# Altium footprint library CHIP-Library.PcbLib: 345 footprints (part 19 of 22)
Each footprint in its own frame and in the unit in brackets; x right, y up, seen from the top. Pads: shape width x height; smd on the part's side, far side on the other; paste and mask are expansions set on the pad; w line width, h text height; cw(c..) or ccw(c..) is an arc to the next point about the centre after c.
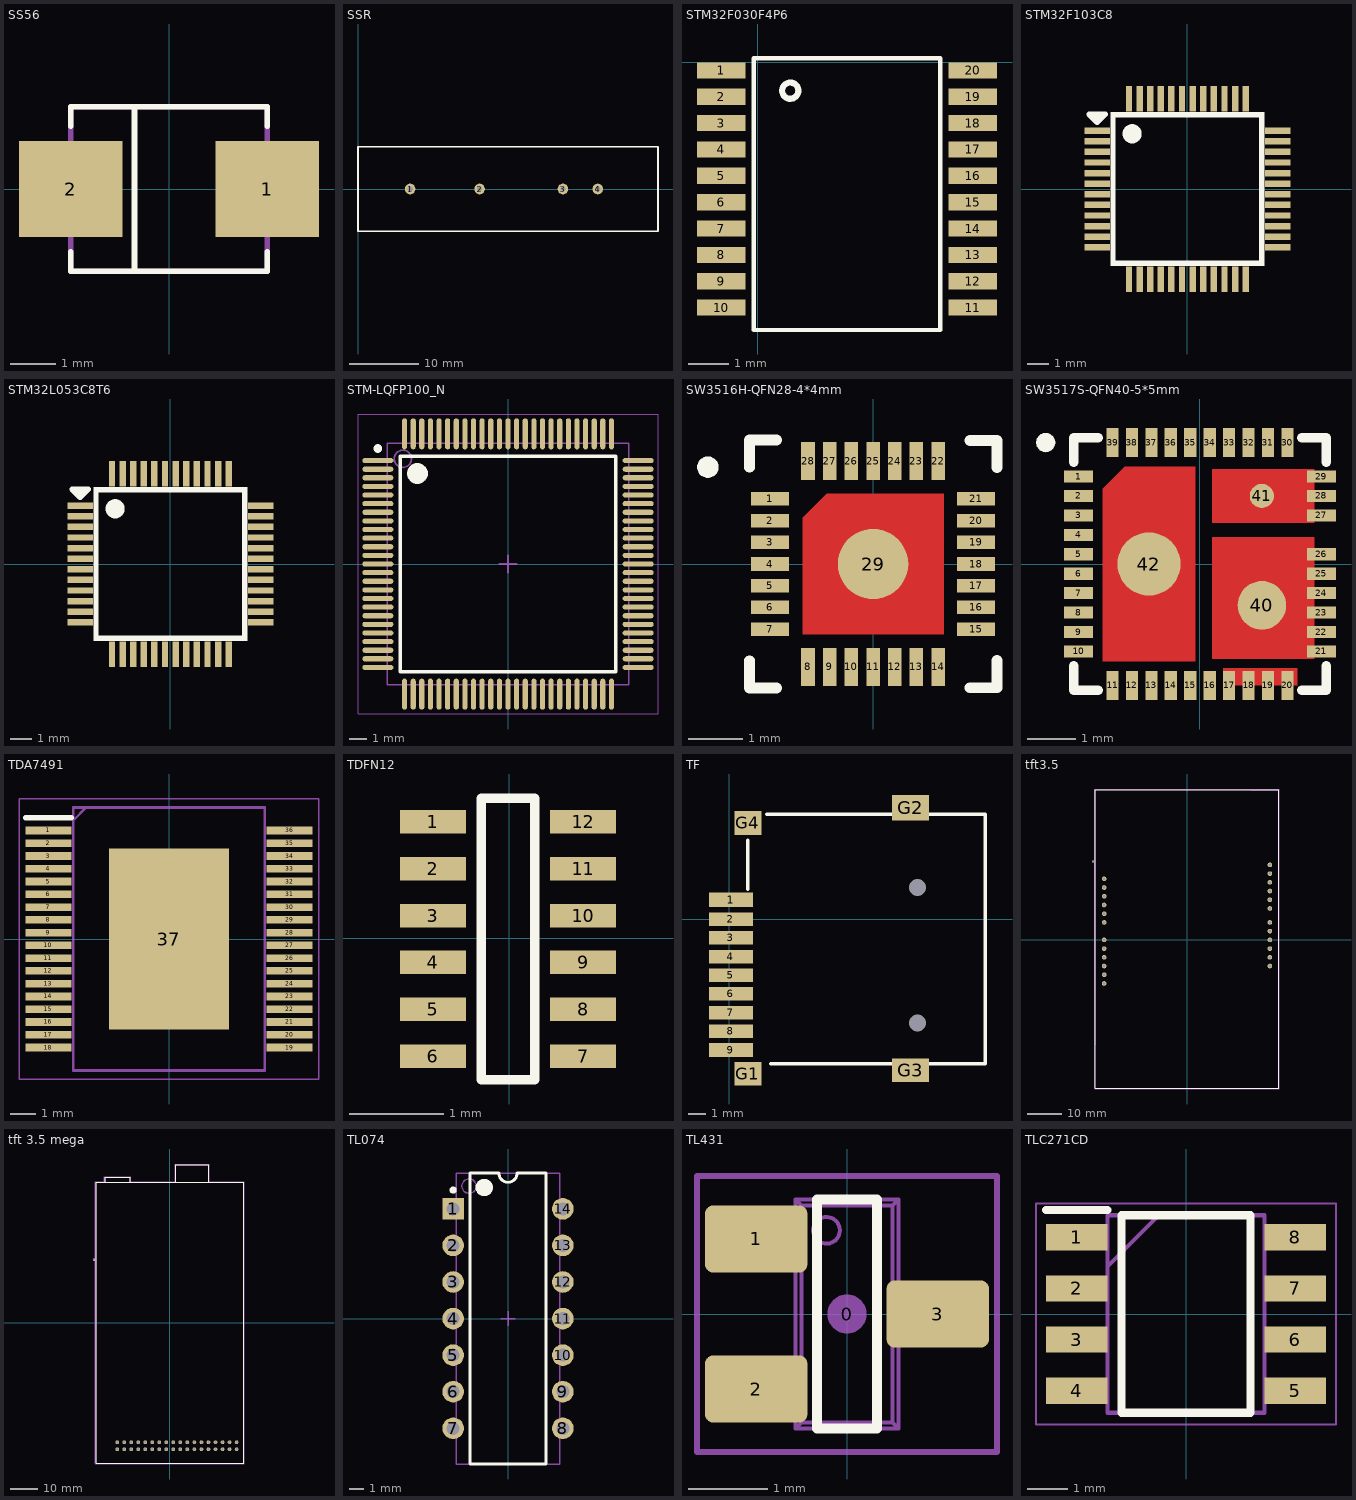
[diagram p18: the footprints below, top view; thin cyan lines are the x and y axes]

## SS56 [mm] "SMB"
height 2.65
pads (2):
  rect 2.28x2.12 smd: 1(2.165,0) 2(-2.165,0)
Top Overlay:
  lines w0.127: -2.163,-1.38 -2.163,-1.813 2.163,-1.813 2.163,-1.38 ; -2.163,1.38 -2.163,1.813 2.163,1.813 2.163,1.38 ; -0.762,-1.813 -0.762,1.813
Mechanical 13:
  lines w0.127: -2.163,-1.813 2.163,-1.813 2.163,1.813 -2.163,1.813 -2.163,-1.813
3D body "step_temp.STEP": height 2.65, standoff 0, extent -2.67,-1.813 2.67,1.813

## SSR [mil] "HHG1D-1"
pads (4):
  round 60 hole 30: 1(295.28,0) 2(688.98,0) 3(1161.42,0) 4(1358.27,0)
Top Overlay:
  lines w10: 0,-240 1700,-240 1700,240 0,240 0,0 0,-240

## STM32F030F4P6 [mm]
pads (20):
  rect 1.2x0.4 smd: 1(-0.9,-0.2) 2(-0.9,-0.85) 3(-0.9,-1.5) 4(-0.9,-2.15) 5(-0.9,-2.8) 6(-0.9,-3.45) 7(-0.9,-4.1) 8(-0.9,-4.75) 9(-0.9,-5.4) 10(-0.9,-6.05) 11(5.3,-6.05) 12(5.3,-5.4) 13(5.3,-4.75) 14(5.3,-4.1) 15(5.3,-3.45) 16(5.3,-2.8) 17(5.3,-2.15) 18(5.3,-1.5) 19(5.3,-0.85) 20(5.3,-0.2)
Top Overlay:
  circle w0.15: c0.8,-0.7 r0.2
  lines w0.1: -0.1,-6.6 -0.1,0.1 4.5,0.1 4.5,-6.6 -0.1,-6.6
3D body "STM32F030F4P6.STEP": height 1.1, standoff -0.09, extent -0.94,-6.5 5.34,0

## STM32F103C8 [mm]
height 5.33
pads (48):
  rect 1.2x0.3 smd mask+0.051: 1(-4.25,2.75) 2(-4.25,2.25) 3(-4.25,1.75) 4(-4.25,1.25) 5(-4.25,0.75) 6(-4.25,0.25) 7(-4.25,-0.25) 8(-4.25,-0.75) 9(-4.25,-1.25) 10(-4.25,-1.75) 11(-4.25,-2.25) 12(-4.25,-2.75) 25(4.25,-2.75) 26(4.25,-2.25) 27(4.25,-1.75) 28(4.25,-1.25) 29(4.25,-0.75) 30(4.25,-0.25) 31(4.25,0.25) 32(4.25,0.75) 33(4.25,1.25) 34(4.25,1.75) 35(4.25,2.25) 36(4.25,2.75)
  rect 0.3x1.2 smd mask+0.051: 13(-2.75,-4.25) 14(-2.25,-4.25) 15(-1.75,-4.25) 16(-1.25,-4.25) 17(-0.75,-4.25) 18(-0.25,-4.25) 19(0.25,-4.25) 20(0.75,-4.25) 21(1.25,-4.25) 22(1.75,-4.25) 23(2.25,-4.25) 24(2.75,-4.25) 37(2.75,4.25) 38(2.25,4.25) 39(1.75,4.25) 40(1.25,4.25) 41(0.75,4.25) 42(0.25,4.25) 43(-0.25,4.25) 44(-0.75,4.25) 45(-1.25,4.25) 46(-1.75,4.25) 47(-2.25,4.25) 48(-2.75,4.25)
Top Overlay:
  circle w0.6: c-2.6,2.6 r0.15
  rectangle: -3.373,-3.627 3.627,-3.373
  region: 3.373,3.373 3.373,-3.627 3.627,-3.627 3.627,3.373
  region: -2.992,-3.373 -3.627,-3.373 -3.627,-3.627 -2.992,-3.627
  region: -3.627,-2.992 -3.627,-3.627 -3.373,-3.627 -3.373,-2.992
  region: -2.992,3.627 -3.627,3.627 -3.627,3.373 -2.992,3.373
  region: -3.373,-3.627 -3.373,3.627 -3.627,3.627 -3.627,-3.627
  region: 3.627,2.992 3.627,3.627 3.373,3.627 3.373,2.992
  rectangle: -3.175,3.373 3.627,3.627
  region: -4.25,3.131 -3.869,3.512 -4.631,3.512
  lines w0.254: -3.5,-3.119 -3.5,-3.5 -3.119,-3.5 ; -3.5,3.119 -3.5,3.5 -3.119,3.5 ; 3.119,-3.5 3.5,-3.5 3.5,-3.119 ; 3.119,3.5 3.5,3.5 3.5,3.119 ; -4.631,3.512 -4.25,3.131 -3.869,3.512 -4.25,3.512 -4.631,3.512
3D body "LQFP48.STEP": height 1.5, standoff 0, extent -4.5,-4.5 4.5,4.5

## STM32L053C8T6 [mm]
height 5.33
pads (48):
  rect 1.2x0.3 smd mask+0.051: 1(-4.25,2.75) 2(-4.25,2.25) 3(-4.25,1.75) 4(-4.25,1.25) 5(-4.25,0.75) 6(-4.25,0.25) 7(-4.25,-0.25) 8(-4.25,-0.75) 9(-4.25,-1.25) 10(-4.25,-1.75) 11(-4.25,-2.25) 12(-4.25,-2.75) 25(4.25,-2.75) 26(4.25,-2.25) 27(4.25,-1.75) 28(4.25,-1.25) 29(4.25,-0.75) 30(4.25,-0.25) 31(4.25,0.25) 32(4.25,0.75) 33(4.25,1.25) 34(4.25,1.75) 35(4.25,2.25) 36(4.25,2.75)
  rect 0.3x1.2 smd mask+0.051: 13(-2.75,-4.25) 14(-2.25,-4.25) 15(-1.75,-4.25) 16(-1.25,-4.25) 17(-0.75,-4.25) 18(-0.25,-4.25) 19(0.25,-4.25) 20(0.75,-4.25) 21(1.25,-4.25) 22(1.75,-4.25) 23(2.25,-4.25) 24(2.75,-4.25) 37(2.75,4.25) 38(2.25,4.25) 39(1.75,4.25) 40(1.25,4.25) 41(0.75,4.25) 42(0.25,4.25) 43(-0.25,4.25) 44(-0.75,4.25) 45(-1.25,4.25) 46(-1.75,4.25) 47(-2.25,4.25) 48(-2.75,4.25)
Top Overlay:
  circle w0.6: c-2.6,2.6 r0.15
  rectangle: -3.175,3.373 3.627,3.627
  region: 3.627,2.992 3.627,3.627 3.373,3.627 3.373,2.992
  region: -3.373,-3.627 -3.373,3.627 -3.627,3.627 -3.627,-3.627
  region: -2.992,3.627 -3.627,3.627 -3.627,3.373 -2.992,3.373
  region: -3.627,-2.992 -3.627,-3.627 -3.373,-3.627 -3.373,-2.992
  region: -2.992,-3.373 -3.627,-3.373 -3.627,-3.627 -2.992,-3.627
  region: 3.373,3.373 3.373,-3.627 3.627,-3.627 3.627,3.373
  rectangle: -3.373,-3.627 3.627,-3.373
  region: -4.25,3.131 -3.869,3.512 -4.631,3.512
  lines w0.254: -3.5,-3.119 -3.5,-3.5 -3.119,-3.5 ; -3.5,3.119 -3.5,3.5 -3.119,3.5 ; 3.119,-3.5 3.5,-3.5 3.5,-3.119 ; 3.119,3.5 3.5,3.5 3.5,3.119 ; -4.631,3.512 -4.25,3.512 -3.869,3.512 -4.25,3.131 -4.631,3.512
3D body "LQFP48.STEP": height 1.5, standoff 0, extent -4.5,-4.5 4.5,4.5

## STM-LQFP100_N [mm] "Thin QFP, 100-Leads, Body 14x14mm, Pitch 0.5mm, IPC Medium Density"
height 1.6
pads (100):
  oval 1.8x0.3 smd: 1(-7.55,6) 2(-7.55,5.5) 3(-7.55,5) 4(-7.55,4.5) 5(-7.55,4) 6(-7.55,3.5) 7(-7.55,3) 8(-7.55,2.5) 9(-7.55,2) 10(-7.55,1.5) 11(-7.55,1) 12(-7.55,0.5) 13(-7.55,0) 14(-7.55,-0.5) 15(-7.55,-1) 16(-7.55,-1.5) 17(-7.55,-2) 18(-7.55,-2.5) 19(-7.55,-3) 20(-7.55,-3.5) 21(-7.55,-4) 22(-7.55,-4.5) 23(-7.55,-5) 24(-7.55,-5.5) 25(-7.55,-6) 51(7.55,-6) 52(7.55,-5.5) 53(7.55,-5) 54(7.55,-4.5) 55(7.55,-4) 56(7.55,-3.5) 57(7.55,-3) 58(7.55,-2.5) 59(7.55,-2) 60(7.55,-1.5) 61(7.55,-1) 62(7.55,-0.5) 63(7.55,0) 64(7.55,0.5) 65(7.55,1) 66(7.55,1.5) 67(7.55,2) 68(7.55,2.5) 69(7.55,3) 70(7.55,3.5) 71(7.55,4) 72(7.55,4.5) 73(7.55,5) 74(7.55,5.5) 75(7.55,6)
  oval 0.3x1.8 smd: 26(-6,-7.55) 27(-5.5,-7.55) 28(-5,-7.55) 29(-4.5,-7.55) 30(-4,-7.55) 31(-3.5,-7.55) 32(-3,-7.55) 33(-2.5,-7.55) 34(-2,-7.55) 35(-1.5,-7.55) 36(-1,-7.55) 37(-0.5,-7.55) 38(0,-7.55) 39(0.5,-7.55) 40(1,-7.55) 41(1.5,-7.55) 42(2,-7.55) 43(2.5,-7.55) 44(3,-7.55) 45(3.5,-7.55) 46(4,-7.55) 47(4.5,-7.55) 48(5,-7.55) 49(5.5,-7.55) 50(6,-7.55) 76(6,7.55) 77(5.5,7.55) 78(5,7.55) 79(4.5,7.55) 80(4,7.55) 81(3.5,7.55) 82(3,7.55) 83(2.5,7.55) 84(2,7.55) 85(1.5,7.55) 86(1,7.55) 87(0.5,7.55) 88(0,7.55) 89(-0.5,7.55) 90(-1,7.55) 91(-1.5,7.55) 92(-2,7.55) 93(-2.5,7.55) 94(-3,7.55) 95(-3.5,7.55) 96(-4,7.55) 97(-4.5,7.55) 98(-5,7.55) 99(-5.5,7.55) 100(-6,7.55)
Top Overlay:
  circle w0.6: c-5.25,5.25 r0.3
  circle w0.25: c-7.55,6.7 r0.125
  lines w0.2: -6.25,-6.25 6.25,-6.25 6.25,6.25 -6.25,6.25 -6.25,-6.25
Mechanical 13:
  circle w0.1: c-6.1,6.1 r0.5
  lines w0.1: -7,-7 7,-7 7,7 -7,7 -7,-7
Mechanical 15:
  lines w0.05: -8.7,-8.7 8.7,-8.7 8.7,8.7 -8.7,8.7 -8.7,-8.7
  lines w0.1: -0.5,0 0.5,0 ; 0,-0.5 0,0.5
3D body "User Library-LQFP-100-11.STEP": height 1.5, standoff 0, extent -8,-8 8,8

## SW3516H-QFN28-4*4mm [mm]
pads (30):
  rect 0.7x0.25 smd mask+0.03: 1(-1.9,1.2) 2(-1.9,0.8) 3(-1.9,0.4) 4(-1.9,0) 5(-1.9,-0.4) 6(-1.9,-0.8) 7(-1.9,-1.2) 15(1.9,-1.2) 16(1.9,-0.8) 17(1.9,-0.4) 18(1.9,0) 19(1.9,0.4) 20(1.9,0.8) 21(1.9,1.2)
  rect 0.25x0.7 smd mask+0.03: 8(-1.2,-1.9) 9(-0.8,-1.9) 10(-0.4,-1.9) 11(0,-1.9) 12(0.4,-1.9) 13(0.8,-1.9) 14(1.2,-1.9) 22(1.2,1.9) 23(0.8,1.9) 24(0.4,1.9) 25(0,1.9) 26(-0.4,1.9) 27(-0.8,1.9) 28(-1.2,1.9)
  round 1.3 smd paste-2: 29(0,0)
  round 0.4 on Top Overlay: ""(-3.048,1.786)
Top Layer:
  region: -0.85,1.3 -1.3,0.85 -1.3,-1.3 1.3,-1.3 1.3,1.3
Top Overlay:
  lines w0.2: -2.282,-1.786 -2.282,-2.286 -1.782,-2.286 ; -2.282,1.786 -2.282,2.286 -1.782,2.286 ; 1.786,-2.282 2.286,-2.282 2.286,-1.782 ; 1.786,2.278 2.286,2.278 2.286,1.778
Top Paste:
  rectangle: -0.975,-0.95 -0.225,-0.25
  rectangle: -0.975,0.25 -0.225,0.95
  rectangle: 0.225,0.225 0.975,0.975
  rectangle: 0.225,-0.95 0.975,-0.25
3D body: height 0.75, standoff 0, extent -2,-2.05 2,2.05

## SW3517S-QFN40-5*5mm [mm]
pads (44):
  rect 0.6x0.25 smd mask+0.03: 1(-2.5,1.8) 2(-2.5,1.4) 3(-2.5,1) 4(-2.5,0.6) 5(-2.5,0.2) 6(-2.5,-0.2) 7(-2.5,-0.6) 8(-2.5,-1) 9(-2.5,-1.4) 10(-2.5,-1.8) 21(2.5,-1.8) 22(2.5,-1.4) 23(2.5,-1) 24(2.5,-0.6) 25(2.5,-0.2) 26(2.5,0.2) 27(2.5,1) 28(2.5,1.4) 29(2.5,1.8)
  rect 0.25x0.6 smd mask+0.03: 11(-1.8,-2.5) 12(-1.4,-2.5) 13(-1,-2.5) 14(-0.6,-2.5) 15(-0.2,-2.5) 16(0.2,-2.5) 17(0.6,-2.5) 18(1,-2.5) 19(1.4,-2.5) 20(1.8,-2.5) 30(1.8,2.5) 31(1.4,2.5) 32(1,2.5) 33(0.6,2.5) 34(0.2,2.5) 35(-0.2,2.5) 36(-0.6,2.5) 37(-1,2.5) 38(-1.4,2.5) 39(-1.8,2.5)
  round 1 smd: 40(1.275,-0.85)
  round 0.5 smd: 41(1.275,1.4)
  round 1.3 smd: 42(-1.05,0)
  round 0.4 on Top Overlay: ""(-3.175,2.5) ""(-3.175,2.5)
Top Layer:
  region: 2,-2.5 0.475,-2.5 0.475,-2.15 2,-2.15
  region: 0.25,0.55 2.35,0.55 2.35,-1.95 0.25,-1.95
  region: -1.55,2 -2,1.55 -2,-2 -0.1,-2 -0.1,2
  region: 0.25,1.95 2.35,1.95 2.35,0.85 0.25,0.85
Top Overlay:
  lines w0.2: -2.6,-2.1 -2.6,-2.6 -2.1,-2.6 ; -2.6,2.1 -2.6,2.6 -2.1,2.6 ; 2.1,-2.6 2.6,-2.6 2.6,-2.1 ; 2.1,2.6 2.6,2.6 2.6,2.1
Top Paste:
  rectangle: 1.275,1.022 2.025,1.722
  rectangle: 0.375,1.022 1.125,1.722
  rectangle: 1.275,-1.55 2.025,-0.85
  rectangle: 0.375,-1.55 1.125,-0.85
  rectangle: 1.275,-0.35 2.025,0.35
  rectangle: 0.375,-0.35 1.125,0.35
  rectangle: -1.893,0.85 -1.143,1.55
  rectangle: -0.975,0.85 -0.225,1.55
  rectangle: -1.893,-0.35 -1.143,0.35
  rectangle: -0.975,-0.35 -0.225,0.35
  rectangle: -0.975,-1.55 -0.225,-0.85
  rectangle: -1.893,-1.55 -1.143,-0.85
3D body: height 0.75, standoff 0, extent -2.5,-2.5 2.5,2.5

## TDA7491 [mm]
height 5.33
pads (37):
  rect 1.8x0.3 smd paste-0.15: 1(-4.725,4.25) 2(-4.725,3.75) 3(-4.725,3.25) 4(-4.725,2.75) 5(-4.725,2.25) 6(-4.725,1.75) 7(-4.725,1.25) 8(-4.725,0.75) 9(-4.725,0.25) 10(-4.725,-0.25) 11(-4.725,-0.75) 12(-4.725,-1.25) 13(-4.725,-1.75) 14(-4.725,-2.25) 15(-4.725,-2.75) 16(-4.725,-3.25) 17(-4.725,-3.75) 18(-4.725,-4.25) 19(4.725,-4.25) 20(4.725,-3.75) 21(4.725,-3.25) 22(4.725,-2.75) 23(4.725,-2.25) 24(4.725,-1.75) 25(4.725,-1.25) 26(4.725,-0.75) 27(4.725,-0.25) 28(4.725,0.25) 29(4.725,0.75) 30(4.725,1.25) 31(4.725,1.75) 32(4.725,2.25) 33(4.725,2.75) 34(4.725,3.25) 35(4.725,3.75) 36(4.725,4.25)
  rect 4.7x7.1 smd: 37(0,0)
Top Overlay:
  lines w0.2: -5.625,4.75 -3.825,4.75
Top Paste:
  rectangle: 3.825,3.625 5.625,3.875
  rectangle: 3.825,3.125 5.625,3.375
  rectangle: 3.825,2.625 5.625,2.875
  rectangle: 3.825,2.125 5.625,2.375
  rectangle: 3.825,1.625 5.625,1.875
  rectangle: 3.825,1.125 5.625,1.375
  rectangle: 3.825,0.625 5.625,0.875
  rectangle: 3.825,0.125 5.625,0.375
  rectangle: 3.825,-0.375 5.625,-0.125
  rectangle: 3.825,-0.875 5.625,-0.625
  rectangle: 3.825,-1.375 5.625,-1.125
  rectangle: 3.825,-1.875 5.625,-1.625
  rectangle: 3.825,-2.375 5.625,-2.125
  rectangle: 3.825,-2.875 5.625,-2.625
  rectangle: 3.825,-3.375 5.625,-3.125
  rectangle: 3.825,-3.875 5.625,-3.625
  rectangle: 3.825,-4.375 5.625,-4.125
  rectangle: 3.825,4.125 5.625,4.375
  rectangle: -5.625,4.125 -3.825,4.375
  rectangle: -5.625,-4.375 -3.825,-4.125
  rectangle: -5.625,-3.875 -3.825,-3.625
  rectangle: -5.625,-3.375 -3.825,-3.125
  rectangle: -5.625,-2.875 -3.825,-2.625
  rectangle: -5.625,-2.375 -3.825,-2.125
  rectangle: -5.625,-1.875 -3.825,-1.625
  rectangle: -5.625,-1.375 -3.825,-1.125
  rectangle: -5.625,-0.875 -3.825,-0.625
  rectangle: -5.625,-0.375 -3.825,-0.125
  rectangle: -5.625,0.125 -3.825,0.375
  rectangle: -5.625,0.625 -3.825,0.875
  rectangle: -5.625,1.125 -3.825,1.375
  rectangle: -5.625,1.625 -3.825,1.875
  rectangle: -5.625,2.125 -3.825,2.375
  rectangle: -5.625,2.625 -3.825,2.875
  rectangle: -5.625,3.125 -3.825,3.375
  rectangle: -5.625,3.625 -3.825,3.875
Mechanical 13:
  lines w0.1: -3.75,4.65 -3.25,5.15 ; -3.75,-5.15 3.75,-5.15 3.75,5.15 -3.75,5.15 -3.75,-5.15
Mechanical 15:
  lines w0.05: -5.875,-5.5 5.875,-5.5 5.875,5.5 -5.875,5.5 -5.875,-5.5
3D body "TDA7491HV13TR.stp": height 2.47, standoff 0, extent -5.15,-5.15 5.15,5.15

## TDFN12 [mm]
pads (12):
  rect 0.7x0.25 smd: 1(-0.813,1.245) 2(-0.813,0.745) 3(-0.813,0.245) 4(-0.813,-0.255) 5(-0.813,-0.755) 6(-0.813,-1.255) 7(0.787,-1.255) 8(0.787,-0.755) 9(0.787,-0.255) 10(0.787,0.245) 11(0.787,0.745) 12(0.787,1.245)
Top Overlay:
  lines w0.1: -0.138,1.495 0.272,1.495 0.272,-1.505 -0.298,-1.505 -0.298,1.495 0.112,1.495
  text "." at -0.635,1.778 h0.2

## TF [mm]
pads (15):
  rect 2.6x0.85 smd: 1(0.088,1.143)
  rect 2.6x0.8 smd: 2(0.088,0.002) 3(0.088,-1.101) 4(0.088,-2.204) 5(0.088,-3.307) 6(0.088,-4.411) 7(0.088,-5.514) 8(0.088,-6.617) 9(0.088,-7.72)
  round 0 hole 1: 11(11.088,1.88) 12(11.088,-6.12)
  rect 1.6x1.4 smd: G1(1.088,-9.12) G4(1.088,5.68)
  rect 2.2x1.5 smd: G2(10.688,6.58)
  rect 2.2x1.4 smd: G3(10.688,-8.92)
Top Overlay:
  lines w0.203: 1.088,1.751 1.088,4.672 ; 2.198,6.18 15.088,6.18 15.088,-8.52 2.452,-8.52

## tft3.5 [mm]
pads (24):
  round 1.358 hole 0.85: 3V3(-24.13,15.24) 5V(-24.13,12.7) GND(-24.13,7.62) GND(-24.13,10.16) LCD_CS(-24.13,-7.62) LCD_D0(24.13,9.144) LCD_D1(24.13,11.684) LCD_D2(24.13,-7.62) LCD_D3(24.13,-5.08) LCD_D4(24.13,-2.54) LCD_D5(24.13,0) LCD_D6(24.13,2.54) LCD_D7(24.13,5.08) LCD_F_CS(-24.13,-12.7) LCD_RD(-24.13,0) LCD_RS(-24.13,-5.08) LCD_RST(-24.13,-10.16) LCD_WR(-24.13,-2.54) SD_DI(24.13,16.764) SD_DO(24.13,19.304) SD_SCK(24.13,21.844) SD_SS(24.13,14.224) ""(-24.13,5.08) ""(-24.13,17.78)
Top Overlay:
  circle w0.24: c-27.4,22.81 r0.12
  lines w0.127: -26.67,-43.18 -26.67,43.688 26.67,43.688 26.67,-43.18 -26.67,-43.18
Mechanical 4:
  circle w0.24: c-27.4,22.81 r0.12
  circle w0.24: c-27.4,22.81 r0.12
  lines w0.127: 26.67,43.688 26.67,-30.353 26.67,43.688 ; 26.67,43.688 18.923,43.688 26.67,43.688 ; -26.67,-43.18 26.67,-43.18 -26.67,-43.18 ; -26.67,-30.353 -26.67,43.688 -26.67,-30.353
Mechanical 16:
  lines w0.05: -26.924,-43.434 26.92,-43.434 26.92,43.942 ; -26.92,-43.434 -26.92,43.942 26.924,43.942
3D body "User Library-3_5TFT-1.STEP": height 8.89, standoff -5.99, extent -28.29,-40.658 27.94,43.706

## tft 3.5 mega [mm]
pads (36):
  round 1.358 hole 0.85: 5V_2(24.13,-43.18) 5V_3(24.13,-45.72) 22(21.59,-43.18) 23(21.59,-45.72) 24(19.05,-43.18) 25(19.05,-45.72) 26(16.51,-43.18) 27(16.51,-45.72) 28(13.97,-43.18) 29(13.97,-45.72) 30(11.43,-43.18) 31(11.43,-45.72) 32(8.89,-43.18) 33(8.89,-45.72) 34(6.35,-43.18) 35(6.35,-45.72) 36(3.81,-43.18) 37(3.81,-45.72) 38(1.27,-43.18) 39(1.27,-45.72) 40(-1.27,-43.18) 41(-1.27,-45.72) 42(-3.81,-43.18) 43(-3.81,-45.72) 44(-6.35,-43.18) 45(-6.35,-45.72) 46(-8.89,-43.18) 47(-8.89,-45.72) 48(-11.43,-43.18) 49(-11.43,-45.72) 50(-13.97,-43.18) 51(-13.97,-45.72) 52(-16.51,-43.18) 53(-16.51,-45.72) GND4(-19.05,-43.18) GND5(-19.05,-45.72)
Top Overlay:
  circle w0.24: c-27.4,22.81 r0.12
  lines w0.127: -23.37,50.8 -23.37,52.61 -14.378,52.61 -14.378,50.8 ; -23.37,50.8 -14.378,50.8 ; -23.37,50.8 -26.67,50.8 -26.67,-50.8 26.67,-50.8 26.67,50.8 14.02,50.8 ; -14.378,50.8 2.22,50.8 ; 2.22,50.8 2.22,57.15 14.02,57.15 14.02,50.8 ; 2.22,50.8 14.02,50.8
Mechanical 4:
  circle w0.24: c-27.4,22.81 r0.12
  circle w0.24: c-27.4,22.81 r0.12
  lines w0.127: -26.67,-50.8 -26.67,50.8 ; -26.67,-50.8 26.67,-50.8 ; -26.67,-50.8 -26.67,50.8 ; -26.67,-50.8 26.67,-50.8 ; -26.67,50.8 -23.37,50.8 ; -26.67,50.8 -23.37,50.8 ; -23.37,50.8 -23.37,52.61 ; -23.37,50.8 -23.37,52.61 ; -23.37,50.8 -14.378,50.8 ; -23.37,50.8 -14.378,50.8 ; -23.37,52.61 -14.378,52.61 ; -23.37,52.61 -14.378,52.61 ; -14.378,50.8 -14.378,52.61 ; -14.378,50.8 -14.378,52.61 ; -14.378,50.8 2.22,50.8 ; -14.378,50.8 2.22,50.8 ; 2.22,50.8 2.22,57.15 ; 2.22,50.8 2.22,57.15 ; 2.22,50.8 14.02,50.8 ; 2.22,50.8 14.02,50.8 ; 2.22,57.15 14.02,57.15 ; 2.22,57.15 14.02,57.15 ; 14.02,50.8 14.02,57.15 ; 14.02,50.8 14.02,57.15 ; 14.02,50.8 26.67,50.8 ; 14.02,50.8 26.67,50.8 ; 26.67,-50.8 26.67,50.8 ; 26.67,-50.8 26.67,50.8
Mechanical 16:
  lines w0.05: -26.92,-51.05 -26.92,51.05 -23.62,51.05 -23.62,52.86 -14.128,52.86 -14.128,51.05 1.97,51.05 1.97,57.4 14.27,57.4 14.27,51.05 26.92,51.05 26.92,-51.05 -26.92,-51.05

## TL074 [mm] "DIP; 14 Leads; Row Spacing 7.62 mm; Pitch 2.54 mm"
height 5.08
pads (14):
  rect 1.5x1.5 hole 0.9: 1(-3.81,7.62)
  round 1.5 hole 0.9: 2(-3.81,5.08) 3(-3.81,2.54) 4(-3.81,0) 5(-3.81,-2.54) 6(-3.81,-5.08) 7(-3.81,-7.62) 8(3.81,-7.62) 9(3.81,-5.08) 10(3.81,-2.54) 11(3.81,0) 12(3.81,2.54) 13(3.81,5.08) 14(3.81,7.62)
Top Overlay:
  circle w0.6: c-1.65,9.1 r0.3
  circle w0.25: c-3.81,8.92 r0.125
  lines w0.2: -2.65,-10.1 2.65,-10.1 2.65,10.1 0.635,10.1 cw(c0,10.1) -0.635,10.1 -2.65,10.1 -2.65,-10.1
Mechanical 13:
  circle w0.1: c-2.7,9.2 r0.5
  lines w0.1: -3.6,-10.1 3.6,-10.1 3.6,10.1 -3.6,10.1 -3.6,-10.1
Mechanical 15:
  lines w0.1: -0.5,0 0.5,0 ; 0,-0.5 0,0.5
3D body: height 5.08, standoff 0, extent -3.6,-10.1 3.6,10.1

## TL431 [mm] "SOT23, 3 pin"
height 1.003
pads (4):
  round 0.5 on Mech15: 0(0,0)
  rrect25% 1.3x0.85 smd: 1(-1.15,0.95) 2(-1.15,-0.95) 3(1.15,0)
Top Overlay:
  lines w0.127: -0.381,-1.45 -0.381,1.45 0.381,1.45 0.381,-1.45 -0.381,-1.45
  text "." at -2.125,0.95 h1.4
Mechanical 13:
  circle w0.05: c-0.26,1.06 r0.169
  lines w0.05: -1.19,-1.19 -1.19,-0.71 ; -1.19,0.71 -1.19,1.19 ; -1.099,-1.19 -1.099,-0.71 ; -1.099,0.71 -1.099,1.19 ; -1.074,-1.19 -1.074,-0.71 ; -1.074,0.71 -1.074,1.19 ; -0.825,-1.19 -0.825,-0.71 ; -0.825,0.71 -0.825,1.19 ; -0.65,-1.19 -1.4,-1.19 -1.4,-0.71 -0.65,-0.71 ; -0.65,0.71 -1.4,0.71 -1.4,1.19 -0.65,1.19 ; 0.65,-0.24 1.4,-0.24 1.4,0.24 0.65,0.24 ; 0.825,-0.24 0.825,0.24 ; 1.074,-0.24 1.074,0.24 ; 1.099,-0.24 1.099,0.24 ; 1.19,-0.24 1.19,0.24 ; -0.65,-1.45 0.65,-1.45 ; -0.65,-1.45 -0.65,1.45 ; -0.65,-1.45 -0.576,-1.376 ; -0.65,1.45 -0.576,1.376 ; -0.65,1.45 0.65,1.45 ; -0.576,-1.376 0.576,-1.376 ; -0.576,-1.376 -0.576,1.376 ; -0.576,1.376 0.576,1.376 ; 0.576,-1.376 0.65,-1.45 ; 0.576,-1.376 0.576,1.376 ; 0.576,1.376 0.65,1.45 ; 0.65,-1.45 0.65,1.45
Mechanical 15:
  lines w0.076: -1.9,-1.75 -1.9,1.75 1.9,1.75 1.9,-1.75 -1.9,-1.75
3D body "SOT23-3.STEP": height 1.29, standoff -0.01, extent -1.4,-1.45 1.4,1.45

## TLC271CD [mm]
pads (8):
  rect 1.528x0.65 smd: 1(-2.711,1.905) 2(-2.711,0.635) 3(-2.711,-0.635) 4(-2.711,-1.905) 5(2.711,-1.905) 6(2.711,-0.635) 7(2.711,0.635) 8(2.711,1.905)
Top Overlay:
  lines w0.2: -3.475,2.58 -1.948,2.58 ; -1.598,-2.452 1.598,-2.452 1.598,2.452 -1.598,2.452 -1.598,-2.452
Mechanical 13:
  lines w0.1: -1.948,1.182 -0.678,2.452 ; -1.948,-2.452 1.948,-2.452 1.948,2.452 -1.948,2.452 -1.948,-2.452
Mechanical 15:
  lines w0.05: -3.725,-2.75 3.725,-2.75 3.725,2.75 -3.725,2.75 -3.725,-2.75
3D body "TLC271CD.stp": height 1.75, standoff 0, extent -2.997,-2.452 2.997,2.452